# Altium footprint library General.PcbLib: 10 footprints
Each footprint in its own frame and in the unit in brackets; x right, y up, seen from the top. Pads: shape width x height; smd on the part's side, far side on the other; paste and mask are expansions set on the pad; w line width, h text height; cw(c..) or ccw(c..) is an arc to the next point about the centre after c.
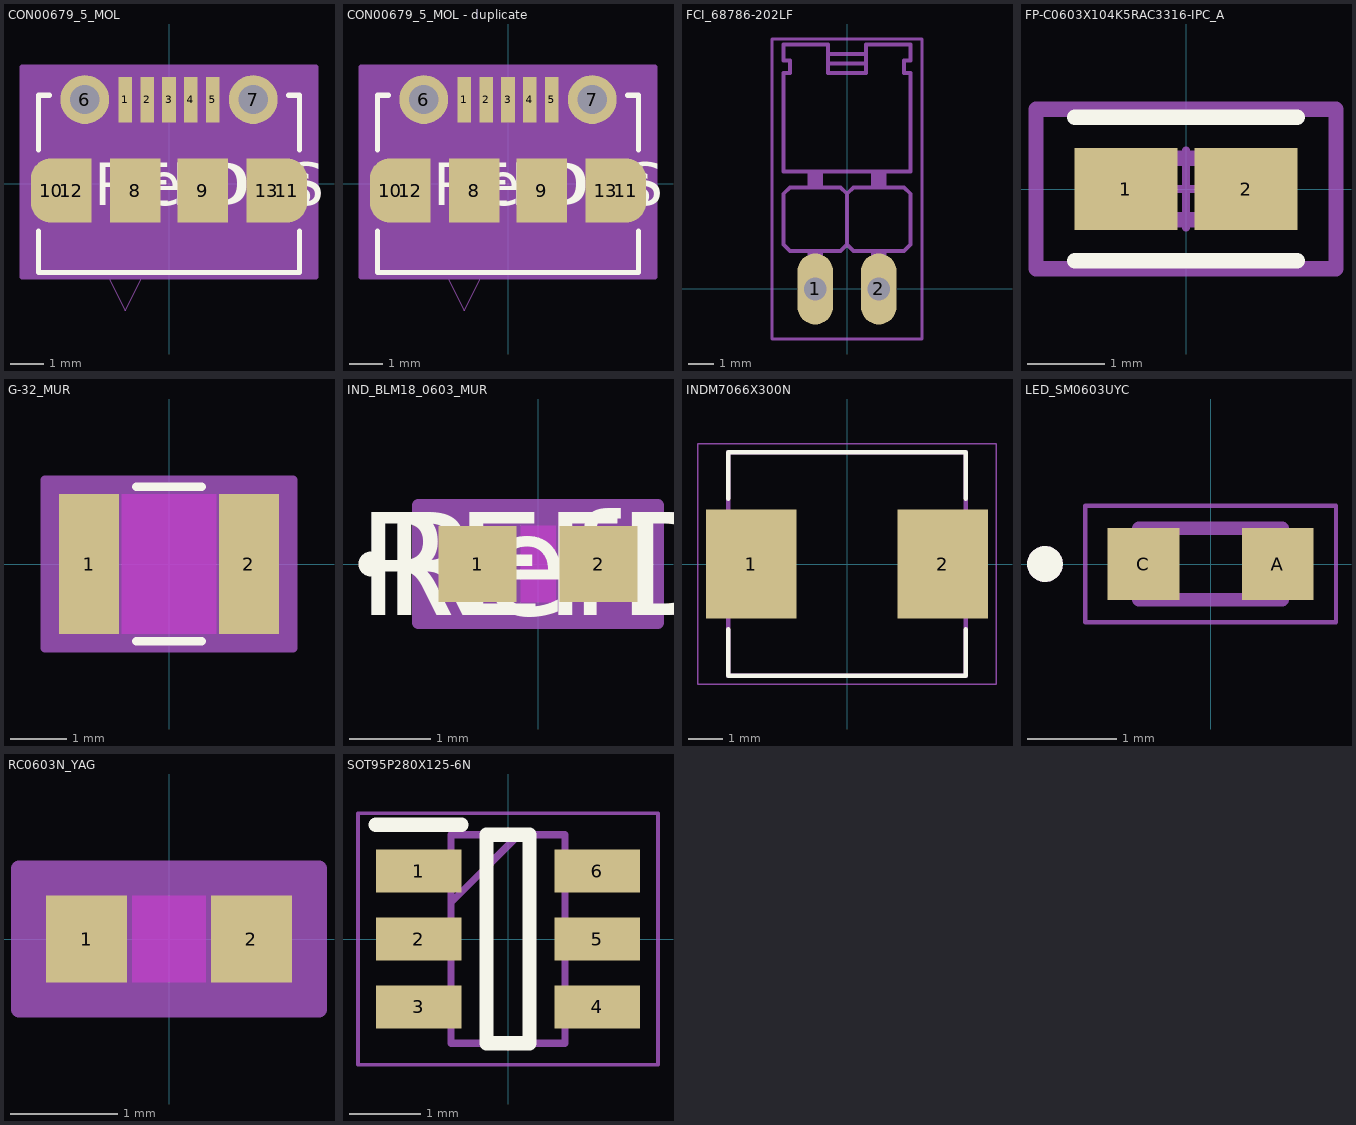
[diagram p0: the footprints below, top view; thin cyan lines are the x and y axes]

## CON00679_5_MOL [mil]
pads (13):
  rect 16x53 smd paste+0 mask+0: 1(-51.24,98.57) 2(-25.65,98.57) 3(0,98.57) 4(25.53,98.57) 5(51.12,98.57)
  round 57 / inner round 60 / far side round 57 hole 34 paste-99999 mask-28.5: 6(-98.49,98.57) 7(98.36,98.57)
  rect 59x75 smd paste-37.5 mask-37.5: 8(-39.43,-7.73) 9(39.31,-7.73)
  oval 47x75 smd paste-37.5 mask-37.5: 10(-137.86,-7.73) 11(137.73,-7.73)
  rect 47.26x75 smd paste-37.5 mask-37.5: 12(-114.24,-7.73) 13(114.08,-7.73)
Top Overlay:
  lines w6: -152.56,-55.24 -152.56,-103.43 152.44,-103.43 152.44,-55.24 ; -152.56,39.79 -152.56,103.57 -139.79,103.57 ; 139.66,103.57 152.44,103.57 152.44,39.79
  text "REFDES" at -87.5,-24.67 h50
  text "RefDes" at -75.3,-24.97 h50
Top 3D Body:
  lines w1: -76.24,-98.43 -51.24,-148.43 -26.24,-98.43 ; -147.56,-98.43 -147.56,98.57 147.44,98.57 147.44,-98.43 -147.56,-98.43
  text "RefDes2" at -87.5,-24.67 h50
Top Courtyard:
  region: 147.44,98.57 147.44,-98.43 -147.56,-98.43 -147.56,98.57
  region: 171.44,136.57 171.44,-108.43 -171.56,-108.43 -171.56,136.57
  lines w6: -171.56,-108.43 171.44,-108.43 171.44,136.57 -171.56,136.57 -171.56,-108.43 ; -147.56,-98.43 147.44,-98.43 147.44,98.57 -147.56,98.57 -147.56,-98.43
Multi-Layer:
  lines w24: -137.86,-21.23 -137.86,5.77 ; 137.73,-21.23 137.73,5.77

## CON00679_5_MOL - duplicate [mil]
pads (13):
  rect 16x53 smd paste+0 mask+0: 1(-51.24,98.57) 2(-25.65,98.57) 3(0,98.57) 4(25.53,98.57) 5(51.12,98.57)
  round 57 / inner round 60 / far side round 57 hole 34 paste-99999 mask-28.5: 6(-98.49,98.57) 7(98.36,98.57)
  rect 59x75 smd paste-37.5 mask-37.5: 8(-39.43,-7.73) 9(39.31,-7.73)
  oval 47x75 smd paste-37.5 mask-37.5: 10(-137.86,-7.73) 11(137.73,-7.73)
  rect 47.26x75 smd paste-37.5 mask-37.5: 12(-114.24,-7.73) 13(114.08,-7.73)
Top Overlay:
  lines w6: -152.56,-55.24 -152.56,-103.43 152.44,-103.43 152.44,-55.24 ; -152.56,39.79 -152.56,103.57 -139.79,103.57 ; 139.66,103.57 152.44,103.57 152.44,39.79
  text "RefDes" at -75.3,-24.97 h50
  text "REFDES" at -87.5,-24.67 h50
Top 3D Body:
  lines w1: -76.24,-98.43 -51.24,-148.43 -26.24,-98.43 ; -147.56,-98.43 147.44,-98.43 147.44,98.57 -147.56,98.57 -147.56,-98.43
  text "RefDes2" at -87.5,-24.67 h50
Top Courtyard:
  region: 171.44,136.57 171.44,-108.43 -171.56,-108.43 -171.56,136.57
  region: 147.44,98.57 147.44,-98.43 -147.56,-98.43 -147.56,98.57
  lines w6: -171.56,-108.43 -171.56,136.57 171.44,136.57 171.44,-108.43 -171.56,-108.43 ; -147.56,-98.43 -147.56,98.57 147.44,98.57 147.44,-98.43 -147.56,-98.43
Multi-Layer:
  lines w24: -137.86,-21.23 -137.86,5.77 ; 137.73,-21.23 137.73,5.77

## FCI_68786-202LF [mil]
pads (2):
  oval 56x112 hole 36: 1(-50,0) 2(50,0)
Top 3D Body:
  region: 62,-10.02 38.06,-10.02 38.06,60 62,60
  region: -38,-10 -62,-10 -62,60 -38,60
  region: -38,160.16 -62.06,160.16 -62.06,185 -38,185
  region: 62,160.25 38.06,160.25 38.06,185 62,185
  lines w6: -30,355 -30,340 30,340 30,355 ; -30,355 -30,370 ; -30,355 30,355 ; -30,370 30,370 ; -30,370 -30,385 -100,385 -100,360 -90,360 -90,340 -100,340 -100,185 100,185 100,340 90,340 90,360 100,360 100,385 30,385 30,370 ; 0,70 -10,60 -90,60 -100,70 -100,150 -90,160 -10,160 0,150 ; 0,70 10,60 90,60 100,70 100,150 90,160 10,160 0,150 ; 0,70 0,150 ; 30,355 30,370
Top Courtyard:
  lines w5: -118.11,-78.74 -118.11,393.7 118.11,393.7 118.11,-78.74 -118.11,-78.74
3D body "step_temp.STEP": height 98, standoff 0, extent -99,0 99,200

## FP-C0603X104K5RAC3316-IPC_A [mil]
pads (2):
  rect 52.2x41.66 smd paste+0 mask+0: 1(-30.54,0) 2(30.54,0)
Top Overlay:
  lines w7.87: -56.64,-36.58 56.64,-36.58 ; -56.64,36.58 56.64,36.58
Top Assembly:
  lines w7.87: -76.32,-40.52 76.32,-40.52 76.32,40.52 -76.32,40.52 -76.32,-40.52
  text ".Designator" at 0,7.41 h39.37
Top 3D Body:
  lines w7.87: -31.5,-15.75 31.5,-15.75 31.5,15.75 -31.5,15.75 -31.5,-15.75
Top Courtyard:
  lines w7.87: -76.32,-40.52 76.32,-40.52 76.32,40.52 -76.32,40.52 -76.32,-40.52
Top Component Center:
  lines w3.94: -19.68,0 19.68,0 ; 0,-19.68 0,19.68
3D body "Cap_KEMET_C0603X104K5RAC3316_eec.STEP": height 10, standoff 0, extent -76.32,-40.52 76.32,40.52

## G-32_MUR [mil]
pads (2):
  rect 42x98 smd paste+0 mask+0: 1(-56,0) 2(56,0)
Top Layer keep-out:
  region: -33,-47 -33,47 33,47 33,-47
Top Overlay:
  lines w6: -22.89,-54 22.89,-54 ; -22.89,54 22.89,54
  text ".Designator" at -137.5,-25 h50
Keep-Out Layer:
  region: -33,-49 -33,49 33,49 33,-49
Top 3D Body:
  lines w1: -63,-49 -63,49 ; -63,-49 63,-49 ; -63,-49 -35,-49 -35,49 -63,49 ; -63,-49 -63,49 ; -63,49 63,49 ; 63,-49 63,49 ; 63,-49 63,49 ; 63,-49 35,-49 35,49 63,49
  text ".Designator" at -137.5,-25 h50
Top Courtyard:
  region: 87,-59 -87,-59 -87,59 87,59
  lines w6: -87,-59 87,-59 87,59 -87,59 -87,-59
3D body "G-32_MUR.step": height 110, standoff 0, extent -62.99,-49.02 62.99,49.02

## IND_BLM18_0603_MUR [mil]
pads (2):
  rect 37.78x37 smd paste+0 mask+0: 1(-29.39,0) 2(29.39,0)
Top Layer keep-out:
  region: -8.5,-16.5 -8.5,16.5 8.5,16.5 8.5,-16.5
Top Overlay:
  circle w6: c-81.28,0 r3
  text "RefDes" at -75,-25 h50
  text "REFDES" at -87.5,-25 h50
Keep-Out Layer:
  region: -8.5,-18.5 -8.5,18.5 8.5,18.5 8.5,-18.5
Top 3D Body:
  circle w0: c-24.39,0 r3
  lines w1: -34.5,-18.5 -34.5,18.5 ; -34.5,-18.5 -10.5,-18.5 -10.5,18.5 -34.5,18.5 ; -34.5,-18.5 34.5,-18.5 ; -34.5,-18.5 -34.5,18.5 ; -34.5,18.5 34.5,18.5 ; 34.5,-18.5 10.5,-18.5 10.5,18.5 34.5,18.5 ; 34.5,-18.5 34.5,18.5 ; 34.5,-18.5 34.5,18.5
  text "RefDes2" at -87.5,-25 h50
Top Courtyard:
  region: 58.28,-28.5 -58.28,-28.5 -58.28,28.5 58.28,28.5
  lines w6: -58.28,-28.5 -58.28,28.5 58.28,28.5 58.28,-28.5 -58.28,-28.5
3D body "IND_BLM18_0603_MUR.step": height 37.01, standoff 0, extent -34.49,-18.5 34.49,18.5

## INDM7066X300N [mm]
height 3
pads (2):
  rect 2.67x3.21 smd: 1(-2.82,0) 2(2.82,0)
Top Overlay:
  lines w0.127: -3.5,-1.925 -3.5,-3.3 3.5,-3.3 3.5,-1.925 ; -3.5,1.925 -3.5,3.3 3.5,3.3 3.5,1.925
Top 3D Body:
  lines w0.127: -3.5,-3.3 -3.5,3.3 3.5,3.3 3.5,-3.3 -3.5,-3.3
Top Courtyard:
  lines w0.05: -4.405,-3.55 4.405,-3.55 4.405,3.55 -4.405,3.55 -4.405,-3.55

## LED_SM0603UYC [mm]
height 0.6
pads (2):
  rect 0.8x0.8 smd: A(0.75,0) C(-0.75,0)
Top Overlay:
  circle w0.2: c-1.85,0 r0.1
Top 3D Body:
  circle w0.2: c-1.85,0 r0.1
  lines w0.152: -0.8,-0.4 0.8,-0.4 0.8,0.4 -0.8,0.4 -0.8,-0.4
Top Courtyard:
  lines w0.05: -1.4,-0.65 -1.4,0.65 1.4,0.65 1.4,-0.65 -1.4,-0.65
3D body "step_temp.STEP": height 0.6, standoff 0, extent -0.8,-0.4 0.8,0.4

## RC0603N_YAG [mil]
pads (2):
  rect 29.78x32 smd paste+0 mask+0: 1(-30.39,0) 2(30.39,0)
Top Layer keep-out:
  region: -13.5,-14 -13.5,14 13.5,14 13.5,-14
Top Overlay:
  text ".Designator" at -137.5,-25 h50
Keep-Out Layer:
  region: -13.5,-16 -13.5,16 13.5,16 13.5,-16
Top 3D Body:
  lines w1: -31.5,-16 -31.5,16 ; -31.5,-16 31.5,-16 ; -31.5,-16 -15.5,-16 -15.5,16 -31.5,16 ; -31.5,-16 -31.5,16 ; -31.5,16 31.5,16 ; 31.5,-16 31.5,16 ; 31.5,-16 31.5,16 ; 31.5,-16 15.5,-16 15.5,16 31.5,16
  text ".Designator" at -137.5,-25 h50
Top Courtyard:
  region: 55.28,-26 -55.28,-26 -55.28,26 55.28,26
  lines w6: -55.28,-26 55.28,-26 55.28,26 -55.28,26 -55.28,-26
3D body "RC0603N_YAG.step": height 27.99, standoff 0, extent -31.5,-15.98 31.5,15.98

## SOT95P280X125-6N [mm]
pads (6):
  rect 1.2x0.6 smd: 1(-1.25,0.95) 2(-1.25,0) 3(-1.25,-0.95) 4(1.25,-0.95) 5(1.25,0) 6(1.25,0.95)
Top Overlay:
  lines w0.2: -1.85,1.6 -0.65,1.6 ; -0.3,-1.46 -0.3,1.46 0.3,1.46 0.3,-1.46 -0.3,-1.46
Top Courtyard:
  lines w0.1: -0.8,0.51 0.15,1.46 ; -0.8,-1.46 -0.8,1.46 0.8,1.46 0.8,-1.46 -0.8,-1.46
Bottom Assembly:
  lines w0.05: -2.1,-1.76 -2.1,1.76 2.1,1.76 2.1,-1.76 -2.1,-1.76